# Altium footprint library LimeMicroAltiumLib.PcbLib: 876 footprints (part 51 of 57)
Each footprint in its own frame and in the unit in brackets; x right, y up, seen from the top. Pads: shape width x height; smd on the part's side, far side on the other; paste and mask are expansions set on the pad; w line width, h text height; cw(c..) or ccw(c..) is an arc to the next point about the centre after c.
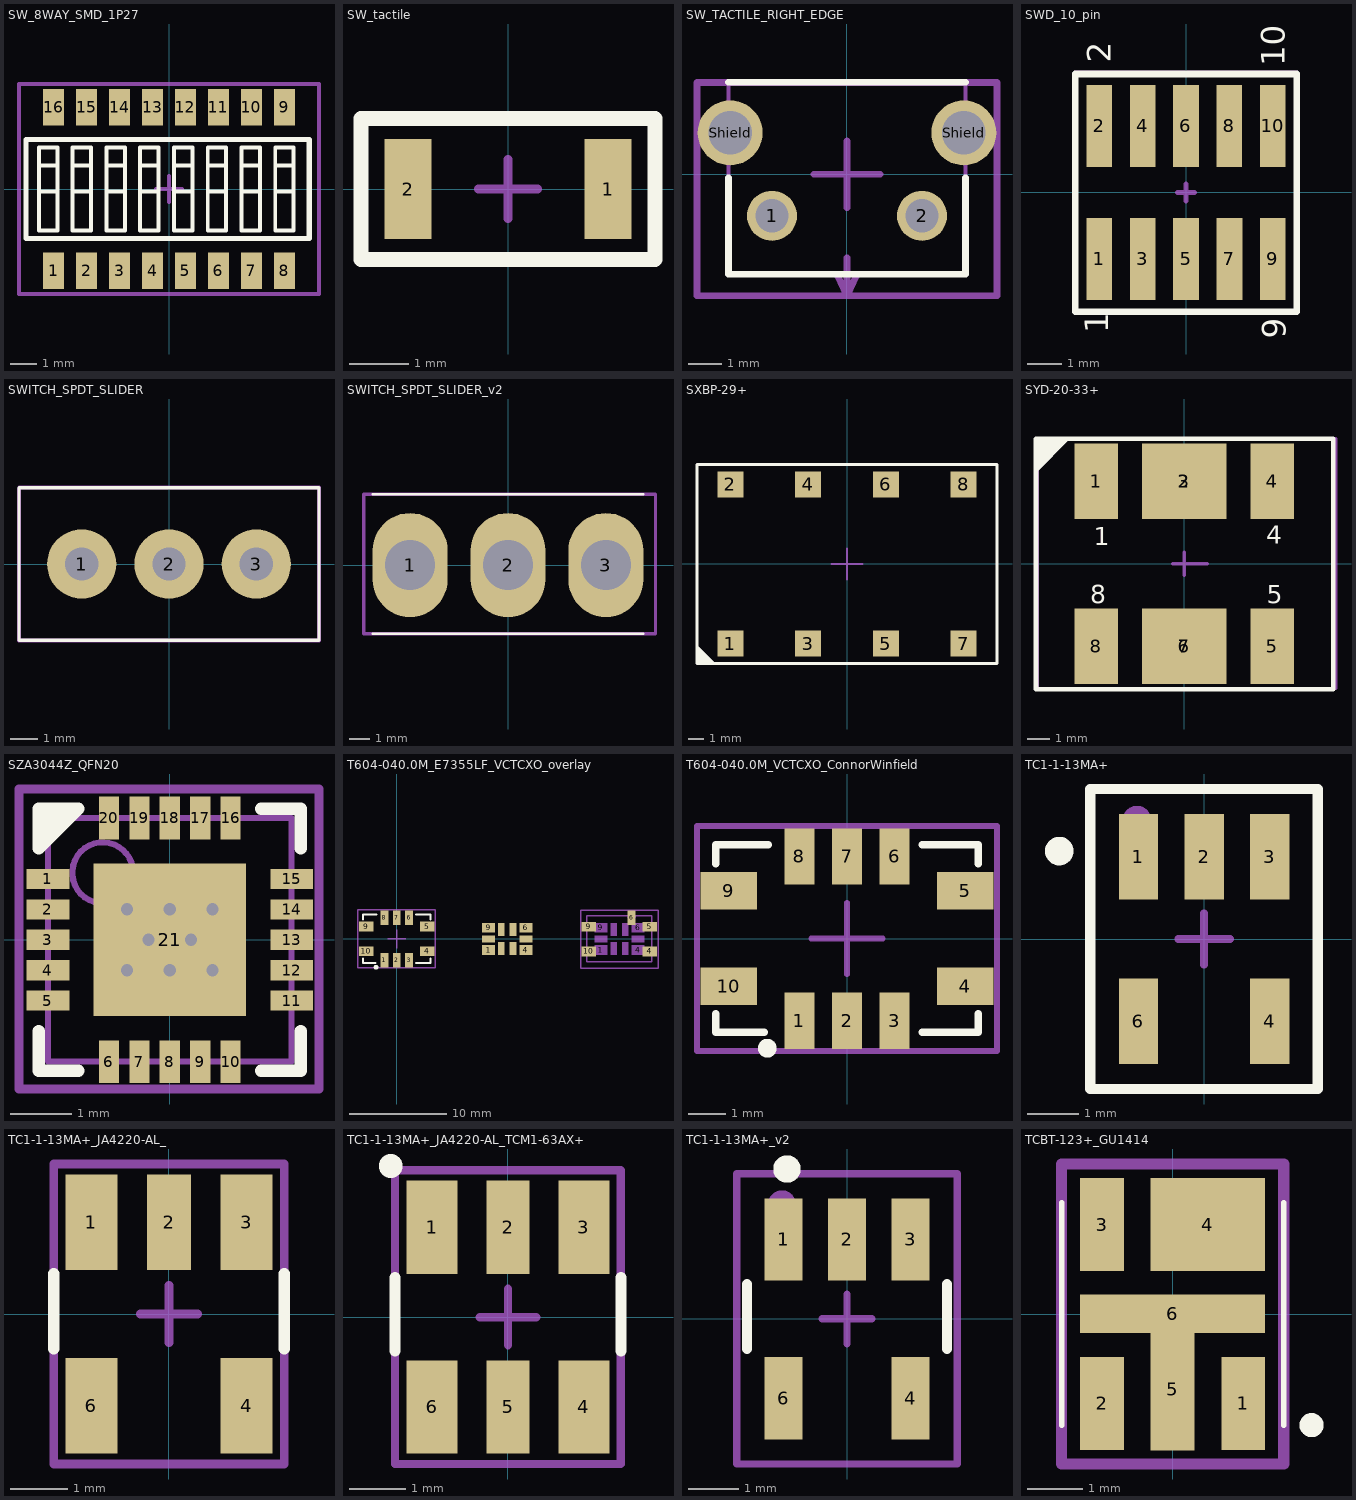
[diagram p50: the footprints below, top view; thin cyan lines are the x and y axes]

## SW_8WAY_SMD_1P27 [mm] "DIP Switch; 16 Leads, 1.27 pitch"
height 5.06
pads (16):
  rect 0.8x1.4 smd: 1(-4.445,-3.15) 2(-3.175,-3.15) 3(-1.905,-3.15) 4(-0.635,-3.15) 5(0.635,-3.15) 6(1.905,-3.15) 7(3.175,-3.15) 8(4.445,-3.15) 9(4.445,3.15) 10(3.175,3.15) 11(1.905,3.15) 12(0.635,3.15) 13(-0.635,3.15) 14(-1.905,3.15) 15(-3.175,3.15) 16(-4.445,3.15)
Top Overlay:
  lines w0.15: -5.01,-0.1 -4.3,-0.1 ; -5.01,0.9 -4.3,0.9 ; -3.71,-0.1 -3,-0.1 ; -3.71,0.9 -3,0.9 ; -2.41,-0.1 -1.7,-0.1 ; -2.41,0.9 -1.7,0.9 ; -1.11,-0.1 -0.4,-0.1 ; -1.11,0.9 -0.4,0.9 ; 0.19,-0.1 0.9,-0.1 ; 0.19,0.9 0.9,0.9 ; 1.49,-0.1 2.2,-0.1 ; 1.49,0.9 2.2,0.9 ; 2.79,-0.1 3.5,-0.1 ; 2.79,0.9 3.5,0.9 ; 4.09,-0.1 4.8,-0.1 ; 4.09,0.9 4.8,0.9 ; -5.01,-1.6 -4.3,-1.6 -4.3,1.6 -5.01,1.6 -5.01,-1.6 ; -3.71,-1.6 -3.71,1.6 -3,1.6 -3,-1.6 -3.71,-1.6 ; -2.41,-1.6 -1.7,-1.6 -1.7,1.6 -2.41,1.6 -2.41,-1.6 ; -1.11,-1.6 -1.11,1.6 -0.4,1.6 -0.4,-1.6 -1.11,-1.6 ; 0.19,-1.6 0.9,-1.6 0.9,1.6 0.19,1.6 0.19,-1.6 ; 1.49,-1.6 1.49,1.6 2.2,1.6 2.2,-1.6 1.49,-1.6 ; 2.79,-1.6 2.79,1.6 3.5,1.6 3.5,-1.6 2.79,-1.6 ; 4.09,-1.6 4.8,-1.6 4.8,1.6 4.09,1.6 4.09,-1.6
  lines w0.2: -5.5,-1.9 5.4,-1.9 5.4,1.9 -5.5,1.9 -5.5,-1.9
Mechanical 15:
  lines w0.15: -0.5,0 0,0 ; 0,-0.5 0,0 ; 0,0.5 0,0 ; 0.5,0 0,0 ; -5.775,-4.05 5.775,-4.05 5.775,4.05 -5.775,4.05 -5.775,-4.05
  text ".Designator" at 0,0 h0.55
  text "1" at -4.6,-3.4 h0.55
  text "8" at 4.25,-3.4 h0.55
3D body "A6H_8101.step": height 1.55, standoff 0, extent -5.695,-3.3 5.695,3.4

## SW_tactile [mm]
pads (2):
  rect 0.8x1.7 smd: 1(1.7,0) 2(-1.7,0)
Top Overlay:
  lines w0.254: -2.5,-1.2 -2.5,1.2 2.5,1.2 2.5,-1.2 -2.5,-1.2
Mechanical 15:
  lines w0.15: -0.5,0 0,0 ; 0,-0.5 0,0 ; 0,0.5 0,0 ; 0.5,0 0,0 ; -2.5,-1.2 2.5,-1.2 2.5,1.2 -2.5,1.2 -2.5,-1.2
  text ".Designator" at 0,0 h0.55
3D body: height 2, standoff 1, extent -1,-1 1,1
3D body: height 1, standoff 0, extent -1.7,-1.1 1.7,1.1

## SW_TACTILE_RIGHT_EDGE [mm] "part number 1825027-5"
pads (4):
  round 1.5 hole 1: 1(-2.25,-1.245) 2(2.25,-1.245)
  round 1.95 hole 1.3: Shield(-3.505,1.245) Shield(3.505,1.245)
Top Overlay:
  lines w0.2: -3.555,-0.1 -3.555,-3 3.555,-3 3.555,-0.1 ; -3.555,2.765 3.555,2.765
Mechanical 13:
  lines w0.127: -3.555,-3 3.555,-3 3.555,2.765 -3.555,2.765 -3.555,-3
Mechanical 15:
  lines w0.2: -1,0 0,0 ; -0.3,-3 0,-3.645 ; 0,-2.5 0,-3.645 ; 0,-1 0,0 ; 0,1 0,0 ; 0.3,-3 0,-3.645 ; 1,0 0,0 ; 0,-3.645 0,-3.645 ; -4.5,-3.645 4.5,-3.645 4.5,2.755 -4.5,2.755 -4.5,-3.645
  text ".Designator" at 0,0 h0.55
  text "Board edge" at -2.6,-2.2 h0.55
3D body "c-1825027-5-g-3d.stp": height 7, standoff -3.52, extent -4.204,-5.106 4.204,2.755

## SWD_10_pin [mm]
pads (10):
  rect 0.75x2.4 smd: 1(-2.55,-1.95) 2(-2.55,1.95) 3(-1.275,-1.95) 4(-1.275,1.95) 5(0,-1.95) 6(0,1.95) 7(1.275,-1.95) 8(1.275,1.95) 9(2.55,-1.95) 10(2.55,1.95)
Top Overlay:
  lines w0.2: -3.25,-3.5 -3.25,3.475 3.25,3.475 3.25,-3.5 -3.25,-3.5
  text "1" at -2.275,-4.125 h0.7
  text "9" at 2.925,-4.3 h0.7
  text "2" at -2.2,3.8 h0.7
  text "10" at 2.9,3.7 h0.7
Mechanical 15:
  lines w0.15: -0.25,0 0.25,0 ; 0,-0.25 0,0.25 ; -3.25,-3.5 -3.25,3.5 3.25,3.5 3.25,-3.5 -3.25,-3.5
  text ".designator" at 0,0 h0.55
3D body "pin_header_a-sl127-dg-g02mp1.stp": height 6.37, standoff -0.03, extent -3.175,-2.752 -1.905,2.752
3D body "pin_header_a-sl127-dg-g02mp1.stp": height 6.37, standoff -0.03, extent -1.905,-2.752 -0.635,2.752
3D body "pin_header_a-sl127-dg-g02mp1.stp": height 6.37, standoff -0.03, extent -0.635,-2.752 0.635,2.752
3D body "pin_header_a-sl127-dg-g02mp1.stp": height 6.37, standoff -0.03, extent 0.635,-2.752 1.905,2.752
3D body "pin_header_a-sl127-dg-g02mp1.stp": height 6.37, standoff -0.03, extent 1.905,-2.752 3.175,2.752

## SWITCH_SPDT_SLIDER [mil] "TE Connectivity SLS121PC04 SPDT slider"
height 396
pads (3):
  round 100 hole 48: 1(-126,0) 2(0,0) 3(126,0)
Top Overlay:
  lines w5: -216.54,-110.24 216.54,-110.24 216.54,110.24 -216.54,110.24 -216.54,-110.24
Mechanical 15:
  lines w5.91: -19.68,0 0,0 ; 0,-19.68 0,0 ; 0,19.68 0,0 ; 19.68,0 0,0 ; -216.54,-110.24 216.54,-110.24 216.54,110.24 -215.55,110.24 -216.54,109.25 -216.54,-110.24
  text ".Designator" at 0,0 h21.65
3D body "Slide Switch SLS121PC04.STEP": height 394, standoff -170, extent -216.49,-109.99 216.51,110.01

## SWITCH_SPDT_SLIDER_v2 [mm] "TE Connectivity SLS121PC04 SPDT slider"
height 10.058
pads (3):
  oval 3.6x5 hole 2.4: 1(-4.7,0) 2(0,0) 3(4.7,0)
Top Overlay:
  lines w0.127: -6.5,-3.3 6.5,-3.3 ; -6.5,3.4 6.5,3.4
Mechanical 15:
  lines w0.15: -0.5,0 0,0 ; 0,-0.5 0,0 ; 0,0.5 0,0 ; 0.5,0 0,0 ; -6.925,-3.3 -6.925,3.4 7.075,3.4 7.075,-3.3 -6.925,-3.3
  text ".Designator" at 0,0 h0.55
3D body: height -0.5, standoff -4.5, extent -5.7,-0.999 -3.7,1
3D body: height -0.5, standoff -4.5, extent -1,-0.999 1,1
3D body: height -0.5, standoff -4.5, extent 3.7,-0.999 5.7,1
3D body: height 11.4, standoff 6.35, extent -3.437,-2.125 0.437,2.125
3D body: height 6.35, standoff 0, extent -6.55,-3.35 6.55,3.35

## SXBP-29+ [mm]
pads (8):
  rect 1.7x1.7 smd mask+0.05: 1(-7.62,-5.2) 2(-7.62,5.2) 3(-2.54,-5.2) 4(-2.54,5.2) 5(2.54,-5.2) 6(2.54,5.2) 7(7.62,-5.2) 8(7.62,5.2)
Top Overlay:
  region: -9.8,-6.5 -9.8,-5.3 -8.6,-6.5
  lines w0.2: -9.8,-6.5 9.8,-6.5 9.8,6.5 -9.8,6.5 -9.8,-6.5
Mechanical 15:
  circle w0.3: c-7.6,-5.2 r0.1
  lines w0.15: -1,0 0,0 ; 0,-1 0,0 ; 0,1 0,0 ; 1,0 0,0 ; -9.8,-6.5 -9.8,6.5 9.8,6.5 9.8,-6.5 -9.8,-6.5
  text ".Designator" at 0,0 h0.55
3D body: height 6.8, standoff 0, extent -9.4,-5.6 9.4,5.6

## SYD-20-33+ [mm]
height 0.6
pads (8):
  rect 1.9x3.3 smd mask+0.05: 1(-3.85,3.6) 4(3.85,3.6) 5(3.85,-3.6) 8(-3.85,-3.6)
  rect 3.7x3.3 smd mask+0.05: 2(0,3.6) 3(0,3.6) 6(0,-3.6) 7(0,-3.6)
Top Overlay:
  region: -6.475,5.45 -6.475,3.975 -5.025,5.425 -5.025,5.45
  lines w0.2: -6.475,-5.475 6.5,-5.475 6.5,5.45 -6.475,5.45 -6.475,-5.475
  text "1" at -3.95,0.8 h0.8
  text "4" at 3.575,0.875 h0.8
  text "5" at 3.6,-1.725 h0.8
  text "8" at -4.1,-1.725 h0.8
Mechanical 13:
  lines w0.1: -6.475,-5.475 -6.475,5.45 6.475,5.45 6.475,-5.475 -6.475,-5.475
Mechanical 15:
  circle w0.2: c-3.85,3.55 r0.106
  lines w0.15: -0.5,0 1,0 ; 0,-0.5 0,0.5 ; -6.425,-5.45 -6.425,5.45 6.625,5.45 6.625,-5.45 -6.425,-5.45
  text ".Designator" at 0,0 h0.55
  text "8" at -4.075,-1.75 h0.55
  text "5" at 3.575,-1.725 h0.55
  text "4" at 3.6,0.85 h0.55
  text "1" at -3.95,0.825 h0.55
3D body: height 6.35, standoff 0, extent -6.35,-4.8 6.35,4.8

## SZA3044Z_QFN20 [mm] "QFN, 20-Leads, Body 4,00x4,00mm, Pitch 0,50mm, Thermal Pad 2,70x2,70mm, IPC Medium Density"
height 0.85
pads (21):
  rect 0.7x0.33 smd mask+0.1: 1(-2,1) 2(-2,0.5) 3(-2,0) 4(-2,-0.5) 5(-2,-1) 11(2,-1) 12(2,-0.5) 13(2,0) 14(2,0.5) 15(2,1)
  rect 0.33x0.7 smd mask+0.1: 6(-1,-2) 7(-0.5,-2) 8(0,-2) 9(0.5,-2) 10(1,-2) 16(1,2) 17(0.5,2) 18(0,2) 19(-0.5,2) 20(-1,2)
  rect 2.5x2.5 smd mask+0.1: 21(0,0)
via 0,-0.5 diameter 0.5 hole 0.2
via -0.7,-0.5 diameter 0.5 hole 0.2
via 0.7,-0.5 diameter 0.5 hole 0.2
via 0.7,0.5 diameter 0.5 hole 0.2
via -0.7,0.5 diameter 0.5 hole 0.2
via 0.35,0 diameter 0.5 hole 0.2
via -0.35,0 diameter 0.5 hole 0.2
via 0,0.5 diameter 0.5 hole 0.2
Top Overlay:
  region: -2.15,1.4 -1.4,2.15 -2.15,2.15
  lines w0.2: -2.15,-1.5 -2.15,-2.15 -1.5,-2.15 ; 1.5,-2.15 2.15,-2.15 2.15,-1.5 ; 1.5,2.15 2.15,2.15 2.15,1.5 ; -2.15,1.5 -2.15,2.15 -1.5,2.15 -2.15,1.5
Mechanical 13:
  circle w0.1: c-1.1,1.1 r0.5
  lines w0.1: -2,-2 2,-2 2,2 -2,2 -2,-2
Mechanical 15:
  circle w0.15: c-2,1 r0.05
  lines w0.15: -0.5,0 0.5,0 ; 0,-0.5 0,0.5 ; -2.475,-2.45 2.45,-2.45 2.45,2.475 -2.475,2.475 -2.475,-2.45
  text ".Designator" at 0,0 h0.55
3D body "User Library-QFN4x4_20pins.step": height 0.8, standoff 0, extent -2.02,-2.02 2.02,2.02

## T604-040.0M_E7355LF_VCTCXO_overlay [mm] "T604-040.0M ConnorWinfield E7355LF rakon VCTCXO overlay"
pads (35):
  rect 0.8x1.5 smd mask+0.07: 1(-1.27,-2.19) 2(0,-2.19) 3(1.27,-2.19) 6(1.27,2.19) 6(24.245,2.165) 7(0,2.19) 8(-1.27,2.19)
  rect 1.35x1 smd mask+0.05: 1(9.475,-1.15) 4(13.325,-1.15) 6(13.325,1.15) 9(9.475,1.15)
  rect 1.35x1 on Mech1 mask+0.05: 1(21.075,-1.15) 4(24.925,-1.15) 6(24.925,1.15) 9(21.075,1.15)
  rect 0.7x1.35 smd mask+0.05: 2(10.8,-0.975) 3(12,-0.975) 7(12,0.975) 8(10.8,0.975)
  rect 0.7x1.35 on Mech1 mask+0.05: 2(22.4,-0.975) 3(23.6,-0.975) 7(23.6,0.975) 8(22.4,0.975)
  rect 1.5x1 smd mask+0.07: 4(3.155,-1.27) 4(26.13,-1.295) 5(3.155,1.27) 5(26.13,1.245) 9(-3.155,1.27) 9(19.82,1.245) 10(-3.155,-1.27) 10(19.82,-1.295)
  rect 1.35x0.7 smd mask+0.05: 5(13.325,0) 10(9.475,0)
  rect 1.35x0.7 on Mech1 mask+0.05: 5(24.925,0) 10(21.075,0)
Top Overlay:
  circle w0.3: c-2.125,-2.925 r0.1
  lines w0.2: -3.5,-2 -3.5,-2.5 -2.2,-2.5 ; -3.5,2 -3.5,2.5 -2.1,2.5 ; 2,-2.5 3.5,-2.5 3.5,-2 ; 2,2.5 3.5,2.5 3.5,2
Mechanical 1:
  lines w0.15: 19.62,-2.365 19.62,-1.656 ccw(c19.62,-1.295) 19.62,-0.934 19.62,0.884 ccw(c19.62,1.245) 19.62,1.606 19.62,2.365 23.884,2.365 ccw(c24.245,2.365) 24.606,2.365 26.33,2.365 26.33,1.606 ccw(c26.33,1.245) 26.33,0.884 26.33,-0.934 ccw(c26.33,-1.295) 26.33,-1.656 26.33,-2.365 19.62,-2.365
  text "GND" at 4.2,-1.6 h0.55
  text "OUT" at 4.2,1 h0.55
  text "EN" at -1,3.3 h0.55
  text "VC" at -5.8,-1.7 h0.55
  text "VCC" at -5.8,0.9 h0.55
  text "T604-040.0M" at -2.7,7.3 h0.55
  text "E7355LF" at 21.2,8.7 h0.55
  text "E7355LF" at 9.7,7.8 h0.55
  text "(5032A)" at 9.7,6.7 h0.55
  text "(5032A)" at 21.3,7.9 h0.55
  text "VCC" at 7.1,1 h0.55
  text "VCO" at 7.2,-1.6 h0.55
  text "FILT" at 12.2,1.9 h0.55
  text "OUT" at 14.2,1 h0.55
  text "GND" at 14.1,-1.6 h0.55
  text "VCC" at 17.2,0.9 h0.55
  text "VC" at 17.2,-1.7 h0.55
  text "OUT" at 27.2,1 h0.55
  text "GND" at 27.2,-1.6 h0.55
  text "FILT" at 24.5,3.3 h0.55
  text "NC" at 0.3,3.3 h0.55
  text "NC" at 1.6,3.3 h0.55
  text "NC" at 1.5,-4.2 h0.55
  text "NC" at 0.3,-4.2 h0.55
  text "NC" at -1,-4.2 h0.55
  text "break out PCB to" at 18.9,7 h0.55
  text "T604-040.0M" at 20.2,5.9 h0.55
Mechanical 15:
  lines w0.15: -0.95,0 0,0 ; 0,-0.95 0,0 ; 0,0.95 0,0 ; 0.95,0 0,0 ; -4,-3 4,-3 4,3 -4,3 -4,-3 ; 18.975,-3.025 18.975,2.975 26.975,2.975 26.975,-3.025 18.975,-3.025
  text "10" at -3.075,-1.475 h0.39
  text "9" at -3.1,1.1 h0.39
  text "8" at -1.325,1.825 h0.39
  text "6" at 1.15,1.85 h0.39
  text "5" at 2.75,1.125 h0.39
  text "4" at 2.775,-1.45 h0.39
  text "3" at 1.125,-2.05 h0.39
  text "1" at -1.35,-2.075 h0.39
  text ".Designator" at 0,0 h0.55
3D body "T604-040.0M.stp": height 2.1, standoff 0, extent -3.651,-2.654 3.651,2.654

## T604-040.0M_VCTCXO_ConnorWinfield [mm]
pads (10):
  rect 0.8x1.5 smd mask+0.07: 1(-1.27,-2.19) 2(0,-2.19) 3(1.27,-2.19) 6(1.27,2.19) 7(0,2.19) 8(-1.27,2.19)
  rect 1.5x1 smd mask+0.07: 4(3.155,-1.27) 5(3.155,1.27) 9(-3.155,1.27) 10(-3.155,-1.27)
Top Overlay:
  circle w0.3: c-2.125,-2.925 r0.1
  lines w0.2: -3.5,-2 -3.5,-2.5 -2.2,-2.5 ; -3.5,2 -3.5,2.5 -2.1,2.5 ; 2,-2.5 3.5,-2.5 3.5,-2 ; 2,2.5 3.5,2.5 3.5,2
Mechanical 15:
  lines w0.15: -0.95,0 0,0 ; 0,-0.95 0,0 ; 0,0.95 0,0 ; 0.95,0 0,0 ; -4,-3 4,-3 4,3 -4,3 -4,-3
  text "10" at -3.075,-1.475 h0.39
  text "9" at -3.1,1.1 h0.39
  text "8" at -1.325,1.825 h0.39
  text "6" at 1.15,1.85 h0.39
  text "5" at 2.75,1.125 h0.39
  text "4" at 2.775,-1.45 h0.39
  text "3" at 1.125,-2.05 h0.39
  text "1" at -1.35,-2.075 h0.39
  text ".Designator" at 0,0 h0.55
3D body "T604-040.0M.stp": height 2.1, standoff 0, extent -3.651,-2.654 3.651,2.654

## TC1-1-13MA+ [mm] "Balun"
pads (5):
  rect 0.76x1.65 smd: 1(-1.27,1.59) 2(0,1.59) 3(1.27,1.59) 4(1.27,-1.59) 6(-1.27,-1.59)
Top Overlay:
  circle w0.35: c-2.8,1.7 r0.1
  lines w0.2: -2.2,-2.9 2.2,-2.9 2.2,2.9 -2.2,2.9 -2.2,-2.9
Mechanical 15:
  circle w0.35: c-1.3,2.3 r0.1
  lines w0.15: -0.5,0 0,0 ; 0,-0.5 0,0 ; 0,0.5 0,0 ; 0.5,0 0,0 ; -2.2,-2.9 2.2,-2.9 2.2,2.9 -2.2,2.9 -2.2,-2.9
  text ".designator" at 0,0 h0.55
3D body "User Library-LQW2BH.step": height 2.8, standoff 1, extent -0.75,-1 0.75,1
3D body: height 1, standoff 0, extent -1.275,-1.612 1.275,1.613

## TC1-1-13MA+_JA4220-AL_ [mm] "Balun compatible with TC1-1-13MA+ and JA4220-AL_"
pads (5):
  rect 0.9x1.65 smd: 1(-1.345,1.59) 3(1.345,1.59) 4(1.345,-1.59) 6(-1.345,-1.59)
  rect 0.76x1.65 smd: 2(0,1.59)
Top Overlay:
  lines w0.2: -2,-0.6 -2,0.7 ; 2,-0.6 2,0.7
Mechanical 13:
  text "NC" at -0.2,2.8 h0.2
  text "Sec" at 1,2.8 h0.2
  text "Sec*" at -1.7,2.8 h0.2
  text "Pri" at 1.1,-3 h0.2
  text "Pri*" at -1.7,-3 h0.2
Mechanical 15:
  circle w0.35: c-1.35,1.65 r0.1
  lines w0.15: -0.5,0 0,0 ; 0,-0.5 0,0 ; 0,0.5 0,0 ; 0.5,0 0,0 ; -2,-2.6 2,-2.6 2,2.6 -2,2.6 -2,-2.6
  text ".designator" at 0,0 h0.55
3D body: height 1, standoff 0, extent -1.275,-1.612 1.275,1.613
3D body "User Library-LQW2BH.step": height 2.8, standoff 1, extent -0.75,-1 0.75,1

## TC1-1-13MA+_JA4220-AL_TCM1-63AX+ [mm] "Balun compatible with TC1-1-13MA+, JA4220-AL_ and TCM1-63AX+"
pads (6):
  rect 0.9x1.65 smd: 1(-1.345,1.59) 3(1.345,1.59) 4(1.345,-1.59) 6(-1.345,-1.59)
  rect 0.76x1.65 smd: 2(0,1.59) 5(0,-1.59)
Top Overlay:
  circle w0.35: c-2.075,2.675 r0.035
  lines w0.2: -2,-0.6 -2,0.7 ; 2,-0.6 2,0.7
Mechanical 13:
  text "NC" at -0.2,2.8 h0.2
  text "Sec" at 1,2.8 h0.2
  text "Sec*" at -1.7,2.8 h0.2
  text "Pri" at 1.1,-3 h0.2
  text "Pri*" at -1.7,-3 h0.2
  text "TCM1-63AX+" at 0.1,3.35 h0.2
  text "NC" at -0.175,-3 h0.2
  text "PRI*" at 1.1,3.15 h0.2
  text "PRI/GND" at -0.4,3.15 h0.2
  text "TC1-1-13MA+" at -1.075,-3.525 h0.2
  text "SEC" at 1.15,-3.25 h0.2
  text "SEC*" at -1.6,-3.25 h0.2
Mechanical 15:
  circle w0.35: c-1.35,1.65 r0.1
  lines w0.15: -0.5,0 0,0 ; 0,-0.5 0,0 ; 0,0.5 0,0 ; 0.5,0 0,0 ; -2,-2.6 2,-2.6 2,2.6 -2,2.6 -2,-2.6
  text ".designator" at 0,0 h0.55
3D body: height 1, standoff 0, extent -1.275,-1.612 1.275,1.613
3D body "User Library-LQW2BH.step": height 2.8, standoff 1, extent -0.75,-1 0.75,1

## TC1-1-13MA+_v2 [mm] "Balun"
pads (5):
  rect 0.76x1.65 smd: 1(-1.27,1.59) 2(0,1.59) 3(1.27,1.59) 4(1.27,-1.59) 6(-1.27,-1.59)
Top Overlay:
  circle w0.35: c-1.2,3 r0.1
  lines w0.2: -2,-0.6 -2,0.7 ; 2,-0.6 2,0.7
Mechanical 15:
  circle w0.35: c-1.3,2.3 r0.1
  lines w0.15: -0.5,0 0,0 ; 0,-0.5 0,0 ; 0,0.5 0,0 ; 0.5,0 0,0 ; -2.2,-2.9 2.2,-2.9 2.2,2.9 -2.2,2.9 -2.2,-2.9
  text ".designator" at 0,0 h0.55
3D body: height 1, standoff 0, extent -1.275,-1.612 1.275,1.613
3D body "User Library-LQW2BH.step": height 2.8, standoff 1, extent -0.75,-1 0.75,1

## TCBT-123+_GU1414 [mm]
pads (6):
  rect 0.79x1.68 smd: 1(1.27,-1.61) 2(-1.27,-1.61) 3(-1.27,1.61)
  rect 2.06x1.68 smd: 4(0.635,1.61)
  rect 0.79x2.21 smd: 5(0,-1.35)
  rect 3.33x0.69 smd: 6(0,0.005)
Top Overlay:
  circle w0.254: c2.5,-2 r0.09
  lines w0.1: -2,-2 -2,2 ; 2,-2 2,2
Mechanical 15:
  circle w0.254: c1.25,-1.75 r0.09
  lines w0.1: -0.2,0 0.2,0 ; 0,-0.2 0,0.2
  lines w0.2: -2,-2.7 -2,2.7 2,2.7 2,-2.7 -2,-2.7
  text ".Designator" at 0,0 h0.55
3D body: height 0.64, standoff 0, extent -1.9,-1.9 1.9,1.9
3D body: height 0.64, standoff 0, extent 1.052,-1.449 1.45,-1.05